# Altium footprint library MY_LIB_IC.PcbLib: 8 footprints
Each footprint in its own frame and in the unit in brackets; x right, y up, seen from the top. Pads: shape width x height; smd on the part's side, far side on the other; paste and mask are expansions set on the pad; w line width, h text height; cw(c..) or ccw(c..) is an arc to the next point about the centre after c.
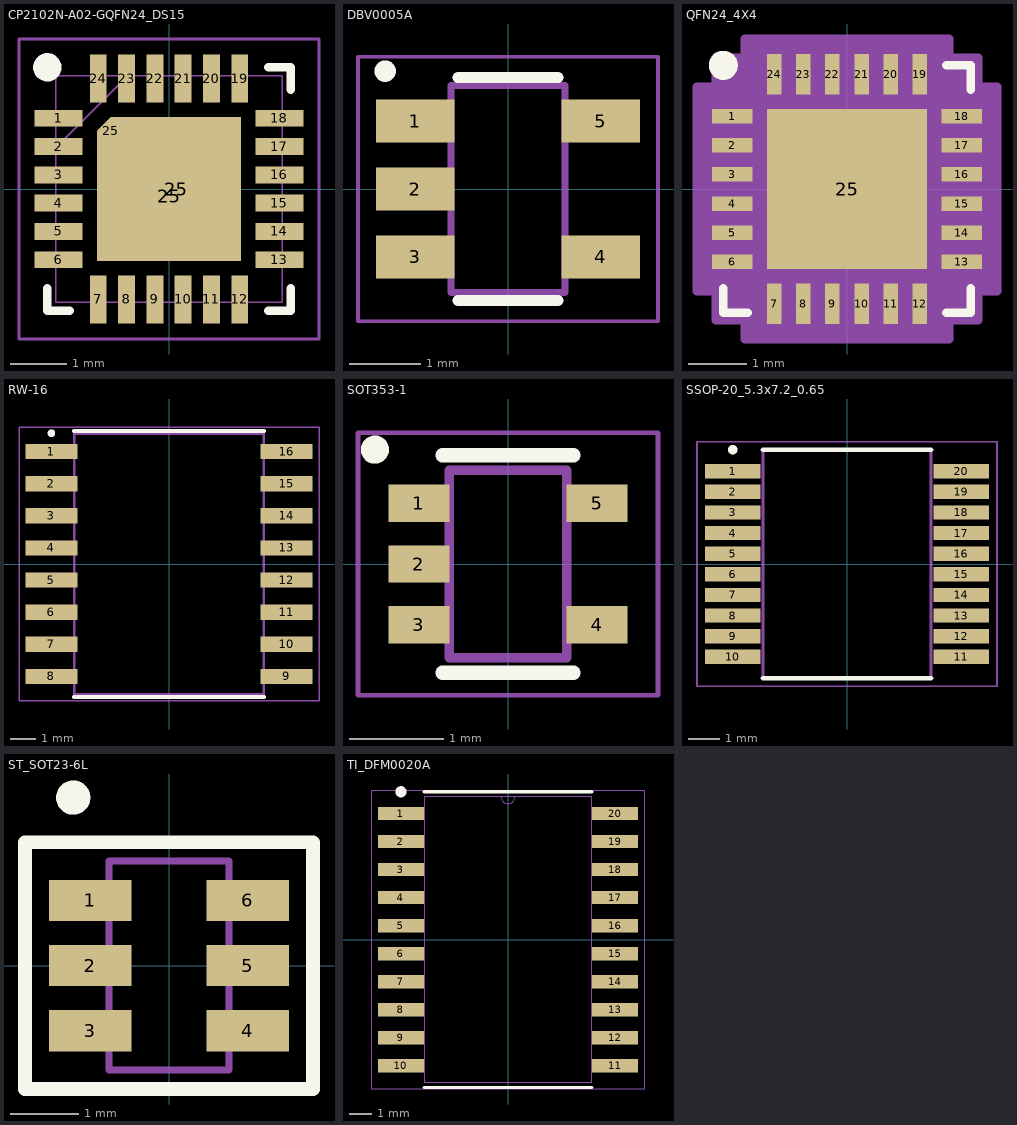
[diagram p0: the footprints below, top view; thin cyan lines are the x and y axes]

## CP2102N-A02-GQFN24_DS15 [mm] "User derivative of official UL A01 export; CP2102N-A02 QFN24 datasheet Rev1.5 Fig7.2; EP25 C0.25"
height 0.8
pads (27):
  rect 0.85x0.3 smd paste+0 mask+0.06: 1(-1.95,1.25) 2(-1.95,0.75) 3(-1.95,0.25) 4(-1.95,-0.25) 5(-1.95,-0.75) 6(-1.95,-1.25) 13(1.95,-1.25) 14(1.95,-0.75) 15(1.95,-0.25) 16(1.95,0.25) 17(1.95,0.75) 18(1.95,1.25)
  rect 0.3x0.85 smd paste+0 mask+0.06: 7(-1.25,-1.95) 8(-0.75,-1.95) 9(-0.25,-1.95) 10(0.25,-1.95) 11(0.75,-1.95) 12(1.25,-1.95) 19(1.25,1.95) 20(0.75,1.95) 21(0.25,1.95) 22(-0.25,1.95) 23(-0.75,1.95) 24(-1.25,1.95)
  rect 0.354x0.354 smd rot 45 paste-2 mask+0.06: 25(-1.025,1.025)
  rect 2.55x2.3 smd paste-2 mask+0.06: 25(0,-0.125)
  rect 2.3x2.55 smd paste-2 mask+0.06: 25(0.125,0)
Top Overlay:
  circle w0.25: c-2.15,2.15 r0.125
  lines w0.15: -2.15,-1.75 -2.15,-2.15 -1.75,-2.15 ; 1.75,-2.15 2.15,-2.15 2.15,-1.75 ; 1.75,2.15 2.15,2.15 2.15,1.75
Top Paste:
  region: -0.15,1.05 -1.05,1.05 -1.05,0.15 -0.15,0.15
  region: -0.15,-0.15 -1.05,-0.15 -1.05,-1.05 -0.15,-1.05
  region: 1.05,1.05 0.15,1.05 0.15,0.15 1.05,0.15
  region: 1.05,-0.15 0.15,-0.15 0.15,-1.05 1.05,-1.05
Mechanical 13:
  circle w0.025: c-1.879,1.25 r0.076
  lines w0.025: -2,0.73 -0.73,2 ; -2,-2 2,-2 2,2 -2,2 -2,-2
  text ".Designator" at -3.492,-0.635 h1.27
Mechanical 15:
  lines w0.05: -2.65,-2.65 2.65,-2.65 2.65,2.65 -2.65,2.65 -2.65,-2.65
3D body "QFN24_4X4.step": height 0.8, standoff 0, extent -2,-2 2,2

## DBV0005A [mm] "TI DBV0005A DBV SOT-23; TI drawing 4214839/K, nominal 0.95mm pitch; pad 1.10x0.60mm, rows 2.60mm c-c; altium native silk; KiCad generic STEP"
height 1.45
pads (5):
  rect 1.1x0.6 smd: 1(-1.3,0.95) 2(-1.3,0) 3(-1.3,-0.95) 4(1.3,-0.95) 5(1.3,0.95)
Top Overlay:
  circle w0.15: c-1.72,1.65 r0.075
  lines w0.15: -0.7,-1.56 0.7,-1.56 ; -0.7,1.56 0.7,1.56
Mechanical 13:
  lines w0.1: -0.8,-1.45 0.8,-1.45 0.8,1.45 -0.8,1.45 -0.8,-1.45
Mechanical 15:
  lines w0.05: -2.1,-1.85 2.1,-1.85 2.1,1.85 -2.1,1.85 -2.1,-1.85
3D body "SOT-23-5.step": height 1.55, standoff 0, extent -0.8,-1.45 0.8,1.45

## QFN24_4X4 [mm]
pads (25):
  rect 0.7x0.25 smd paste+0 mask+0: 1(-1.975,1.25) 2(-1.975,0.75) 3(-1.975,0.25) 4(-1.975,-0.25) 5(-1.975,-0.75) 6(-1.975,-1.25) 13(1.975,-1.25) 14(1.975,-0.75) 15(1.975,-0.25) 16(1.975,0.25) 17(1.975,0.75) 18(1.975,1.25)
  rect 0.25x0.7 smd paste+0 mask+0: 7(-1.25,-1.975) 8(-0.75,-1.975) 9(-0.25,-1.975) 10(0.25,-1.975) 11(0.75,-1.975) 12(1.25,-1.975) 19(1.25,1.975) 20(0.75,1.975) 21(0.25,1.975) 22(-0.25,1.975) 23(-0.75,1.975) 24(-1.25,1.975)
  rect 2.75x2.75 smd paste-1.362 mask+0: 25(0,0)
Top Overlay:
  circle w0.25: c-2.127,2.127 r0.125
  lines w0.152: -2.127,-1.708 -2.127,-2.127 -1.708,-2.127 ; 1.708,-2.127 2.127,-2.127 2.127,-1.708 ; 1.708,2.127 2.127,2.127 2.127,1.708
Top Paste:
  region: -0.1,1.275 -1.275,1.275 -1.275,0.1 -0.1,0.1
  region: -0.1,-0.1 -1.275,-0.1 -1.275,-1.275 -0.1,-1.275
  region: 1.275,1.275 0.1,1.275 0.1,0.1 1.275,0.1
  region: 1.275,-0.1 0.1,-0.1 0.1,-1.275 1.275,-1.275
Mechanical 13:
  circle w0.025: c-1.879,1.25 r0.076
  lines w0.025: -2,0.73 -0.73,2 ; -2,-2 2,-2 2,2 -2,2 -2,-2
  text ".Designator" at -3.492,-0.635 h1.27
Mechanical 15:
  region: -1.758,-2.254 -2.254,-2.254 -2.254,-1.758 -2.579,-1.758 -2.579,1.758 -2.254,1.758 -2.254,2.254 -1.758,2.254 -1.758,2.579 1.758,2.579 1.758,2.254 2.254,2.254 2.254,1.758 2.579,1.758 2.579,-1.758 2.254,-1.758 2.254,-2.254 1.758,-2.254 1.758,-2.579 -1.758,-2.579
  lines w0.152: -2.579,-1.758 -2.254,-1.758 -2.254,-2.254 -1.758,-2.254 -1.758,-2.579 1.758,-2.579 1.758,-2.254 2.254,-2.254 2.254,-1.758 2.579,-1.758 2.579,1.758 2.254,1.758 2.254,2.254 1.758,2.254 1.758,2.579 -1.758,2.579 -1.758,2.254 -2.254,2.254 -2.254,1.758 -2.579,1.758 -2.579,-1.758
3D body "QFN24_4X4.step": height 0.8, standoff 0, extent -2,-2 2,2

## RW-16 [mm] "ADI RW-16 wide SOIC; 1.27mm pitch, 2.05 x 0.60mm pads with 9.30mm row spacing; KiCad land pattern and generic STEP"
height 2.65
pads (16):
  rect 2.05x0.6 smd: 1(-4.65,4.445) 2(-4.65,3.175) 3(-4.65,1.905) 4(-4.65,0.635) 5(-4.65,-0.635) 6(-4.65,-1.905) 7(-4.65,-3.175) 8(-4.65,-4.445) 9(4.65,-4.445) 10(4.65,-3.175) 11(4.65,-1.905) 12(4.65,-0.635) 13(4.65,0.635) 14(4.65,1.905) 15(4.65,3.175) 16(4.65,4.445)
Top Overlay:
  circle w0.15: c-4.65,5.17 r0.075
  lines w0.15: -3.75,-5.26 3.75,-5.26 ; -3.75,5.26 3.75,5.26
Mechanical 13:
  lines w0.1: -3.75,-5.15 3.75,-5.15 3.75,5.15 -3.75,5.15 -3.75,-5.15
Mechanical 15:
  lines w0.05: -5.93,-5.4 5.93,-5.4 5.93,5.4 -5.93,5.4 -5.93,-5.4
3D body "SOIC-16W_7.5x10.3mm_P1.27mm.step": height 2.65, standoff 0, extent -3.75,-5.15 3.75,5.15

## SOT353-1 [mm] "SOT353-1 (TSSOP5) Nexperia 74HC1G08GW; IPC nominal 0.65mm pitch, pad 0.65x0.40mm, rows 1.90mm c-c; altium native silk; KiCad generic STEP"
height 1.05
pads (5):
  rect 0.65x0.4 smd: 1(-0.95,0.65) 2(-0.95,0) 3(-0.95,-0.65) 4(0.95,-0.65) 5(0.95,0.65)
Top Overlay:
  circle w0.15: c-1.42,1.22 r0.075
  lines w0.15: -0.7,-1.16 0.7,-1.16 ; -0.7,1.16 0.7,1.16
Mechanical 13:
  lines w0.1: -0.625,-1 0.625,-1 0.625,1 -0.625,1 -0.625,-1
Mechanical 15:
  lines w0.05: -1.6,-1.4 1.6,-1.4 1.6,1.4 -1.6,1.4 -1.6,-1.4
3D body "SOT-353_SC-70-5.step": height 1.05, standoff 0, extent -0.625,-1 0.625,1

## SSOP-20_5.3x7.2_0.65 [mm] "Microchip MCP3911A0-E/SS SSOP-20 (SS); Microchip land pattern C04-2072B, pad 0.45x1.75mm, pitch 0.65mm, rows 7.20mm c-c; altium native silk; KiCad generic STEP"
height 2
pads (20):
  rect 1.75x0.45 smd: 1(-3.6,2.925) 2(-3.6,2.275) 3(-3.6,1.625) 4(-3.6,0.975) 5(-3.6,0.325) 6(-3.6,-0.325) 7(-3.6,-0.975) 8(-3.6,-1.625) 9(-3.6,-2.275) 10(-3.6,-2.925) 11(3.6,-2.925) 12(3.6,-2.275) 13(3.6,-1.625) 14(3.6,-0.975) 15(3.6,-0.325) 16(3.6,0.325) 17(3.6,0.975) 18(3.6,1.625) 19(3.6,2.275) 20(3.6,2.925)
Top Overlay:
  circle w0.15: c-3.6,3.6 r0.075
  lines w0.15: -2.65,-3.6 2.65,-3.6 ; -2.65,3.6 2.65,3.6
Mechanical 13:
  lines w0.1: -2.65,-3.6 2.65,-3.6 2.65,3.6 -2.65,3.6 -2.65,-3.6
Mechanical 15:
  lines w0.05: -4.725,-3.85 4.725,-3.85 4.725,3.85 -4.725,3.85 -4.725,-3.85
3D body "SSOP-20_5.3x7.2mm_P0.65mm.step": height 2.1, standoff 0, extent -2.65,-3.6 2.65,3.6

## ST_SOT23-6L [mm] "SOT23, 6-Leads, Body 2.93x2.80mm, Pitch 0.95mm, IPC Medium Density"
height 1.45
pads (6):
  rect 1.2x0.6 smd: 1(-1.15,0.95) 2(-1.15,0) 3(-1.15,-0.95) 4(1.15,-0.95) 5(1.15,0) 6(1.15,0.95)
Top Overlay:
  circle w0.25: c-1.397,2.45 r0.125
  lines w0.2: -2.1,-1.8 2.1,-1.8 2.1,1.8 -2.1,1.8 -2.1,-1.8
Mechanical 13:
  lines w0.1: -0.875,-1.525 -0.875,1.525 0.875,1.525 0.875,-1.525 -0.875,-1.525
3D body "ST_SOT23-6L.step": height 1.45, standoff 0, extent -1.6,-1.525 1.6,1.525

## TI_DFM0020A [mm] "TI DFM0020A SOIC20 for ISOW1432DFMR; TI land pattern 2.1x0.6mm, pitch1.27mm, rows9.7mm"
height 3.55
pads (20):
  rect 2.1x0.6 smd paste+0 mask+0.05: 1(-4.85,5.715) 2(-4.85,4.445) 3(-4.85,3.175) 4(-4.85,1.905) 5(-4.85,0.635) 6(-4.85,-0.635) 7(-4.85,-1.905) 8(-4.85,-3.175) 9(-4.85,-4.445) 10(-4.85,-5.715) 11(4.85,-5.715) 12(4.85,-4.445) 13(4.85,-3.175) 14(4.85,-1.905) 15(4.85,-0.635) 16(4.85,0.635) 17(4.85,1.905) 18(4.85,3.175) 19(4.85,4.445) 20(4.85,5.715)
Top Overlay:
  circle w0.25: c-4.85,6.7 r0.125
  lines w0.15: -3.8,-6.7 3.8,-6.7 ; -3.8,6.7 3.8,6.7
Mechanical 13:
  lines w0.025: -0.305,6.464 ccw(c0,6.464) 0.305,6.464 ; -5.321,-5.969 -5.321,-5.461 -3.797,-5.461 -3.797,-5.969 -5.321,-5.969 ; -5.321,-4.699 -5.321,-4.191 -3.797,-4.191 -3.797,-4.699 -5.321,-4.699 ; -5.321,-3.429 -5.321,-2.921 -3.797,-2.921 -3.797,-3.429 -5.321,-3.429 ; -5.321,-2.159 -5.321,-1.651 -3.797,-1.651 -3.797,-2.159 -5.321,-2.159 ; -5.321,-0.889 -5.321,-0.381 -3.797,-0.381 -3.797,-0.889 -5.321,-0.889 ; -5.321,0.381 -5.321,0.889 -3.797,0.889 -3.797,0.381 -5.321,0.381 ; -5.321,1.651 -5.321,2.159 -3.797,2.159 -3.797,1.651 -5.321,1.651 ; -5.321,2.921 -5.321,3.429 -3.797,3.429 -3.797,2.921 -5.321,2.921 ; -5.321,4.191 -5.321,4.699 -3.797,4.699 -3.797,4.191 -5.321,4.191 ; -5.321,5.461 -5.321,5.969 -3.797,5.969 -3.797,5.461 -5.321,5.461 ; -3.797,-6.464 3.797,-6.464 3.797,6.464 -3.797,6.464 -3.797,-6.464 ; 3.797,-5.969 3.797,-5.461 5.321,-5.461 5.321,-5.969 3.797,-5.969 ; 3.797,-4.699 3.797,-4.191 5.321,-4.191 5.321,-4.699 3.797,-4.699 ; 3.797,-3.429 3.797,-2.921 5.321,-2.921 5.321,-3.429 3.797,-3.429 ; 3.797,-2.159 3.797,-1.651 5.321,-1.651 5.321,-2.159 3.797,-2.159 ; 3.797,-0.889 3.797,-0.381 5.321,-0.381 5.321,-0.889 3.797,-0.889 ; 3.797,0.381 3.797,0.889 5.321,0.889 5.321,0.381 3.797,0.381 ; 3.797,1.651 3.797,2.159 5.321,2.159 5.321,1.651 3.797,1.651 ; 3.797,2.921 3.797,3.429 5.321,3.429 5.321,2.921 3.797,2.921 ; 3.797,4.191 3.797,4.699 5.321,4.699 5.321,4.191 3.797,4.191 ; 3.797,5.461 3.797,5.969 5.321,5.969 5.321,5.461 3.797,5.461
  text ".Designator" at -3.492,-0.635 h1.27
  text "*" at -3.734,5.118 h1.27
Mechanical 15:
  lines w0.05: -6.2,-6.75 6.2,-6.75 6.2,6.75 -6.2,6.75 -6.2,-6.75
3D body "SOIC_2DFM_TEX.step": height 3.56, standoff 0, extent -5.321,-6.464 5.321,6.464